# Altium footprint library 2.11-TQFP封装.PcbLib: 71 footprints (part 3 of 5)
Each footprint in its own frame and in the unit in brackets; x right, y up, seen from the top. Pads: shape width x height; smd on the part's side, far side on the other; paste and mask are expansions set on the pad; w line width, h text height; cw(c..) or ccw(c..) is an arc to the next point about the centre after c.
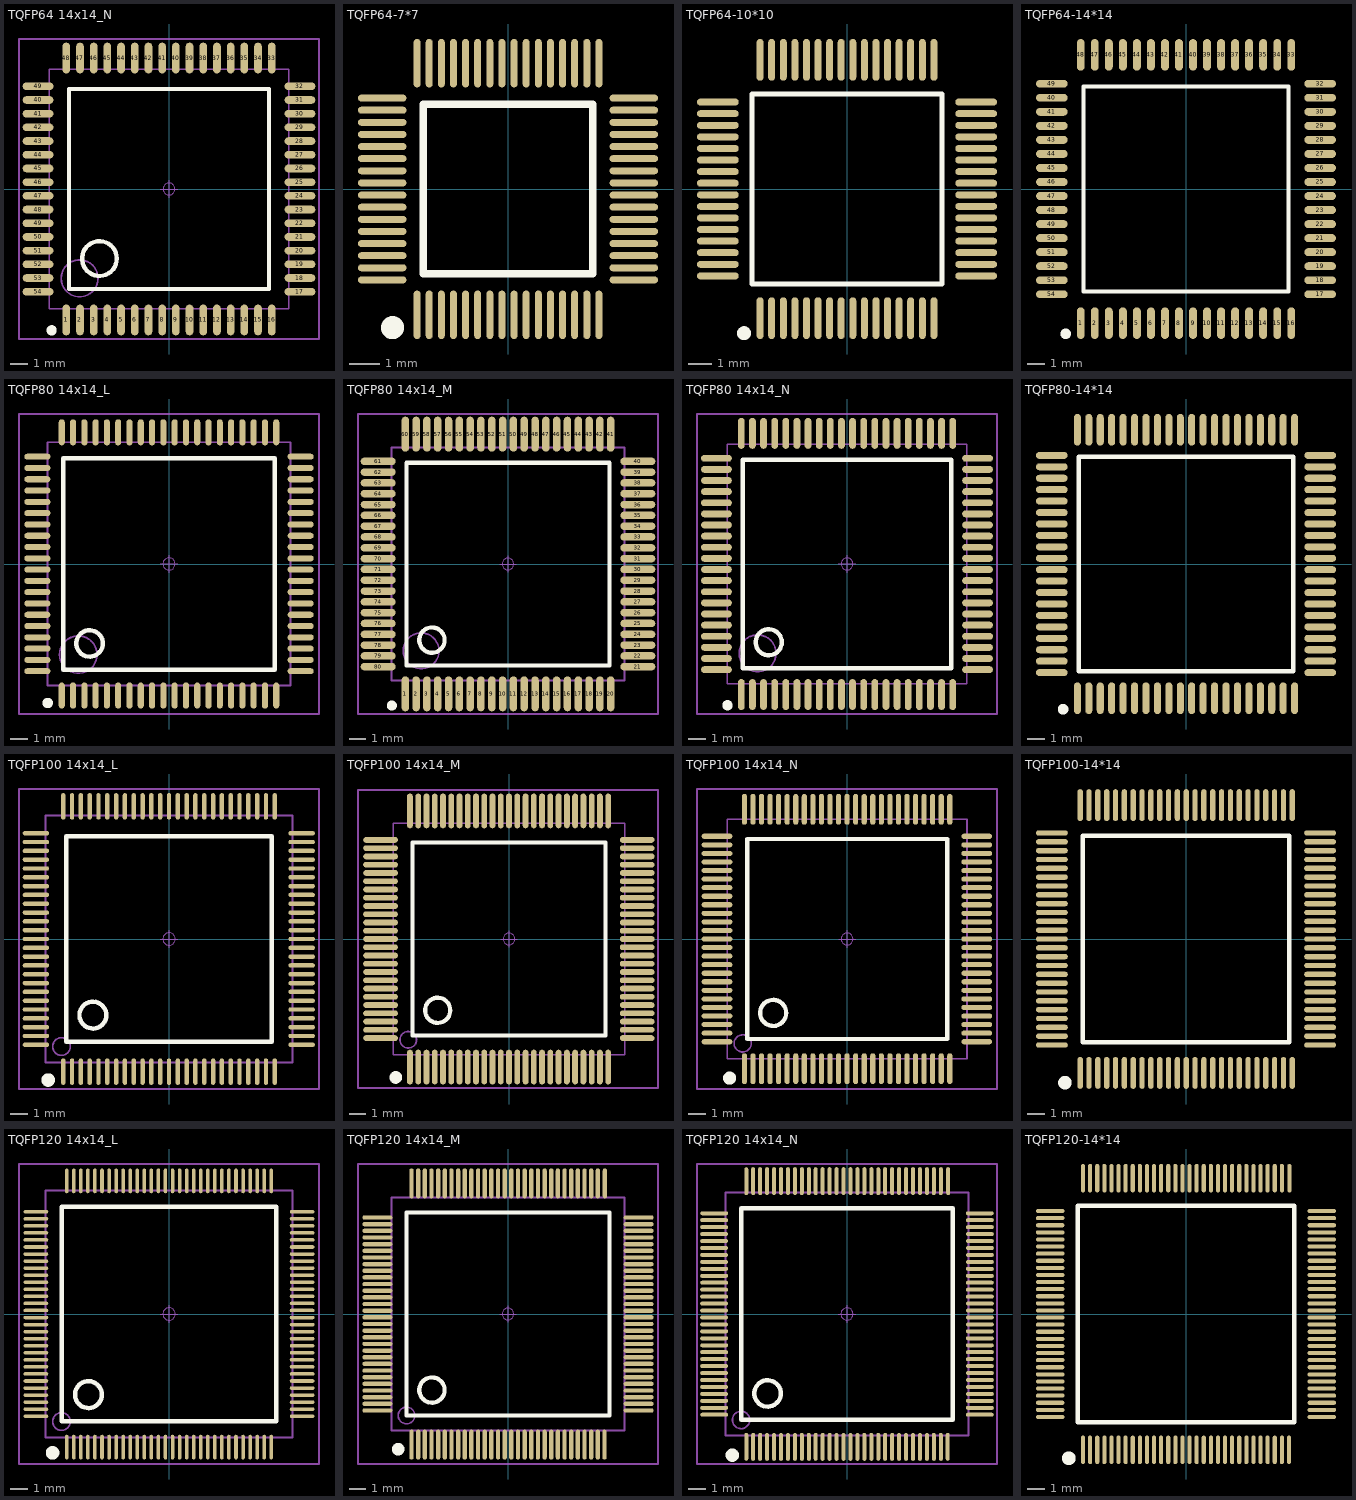
[diagram p2: the footprints below, top view; thin cyan lines are the x and y axes]

## TQFP64 14x14_N [mm] "64脚，体宽：14x14mm, 脚距：0.8mm"
pads (64):
  oval 0.45x1.8 smd: 1(-6,-7.651) 2(-5.2,-7.651) 3(-4.4,-7.651) 4(-3.6,-7.651) 5(-2.8,-7.651) 6(-2,-7.651) 7(-1.2,-7.651) 8(-0.4,-7.651) 9(0.4,-7.651) 10(1.2,-7.651) 11(2,-7.651) 12(2.8,-7.651) 13(3.6,-7.651) 14(4.4,-7.651) 15(5.2,-7.651) 16(6,-7.651) 33(6,7.651) 34(5.2,7.651) 35(4.4,7.651) 36(3.6,7.651) 37(2.8,7.651) 38(2,7.651) 39(1.2,7.651) 40(0.4,7.651) 41(-0.4,7.651) 42(-1.2,7.651) 43(-2,7.651) 44(-2.8,7.651) 45(-3.6,7.651) 46(-4.4,7.651) 47(-5.2,7.651) 48(-6,7.651)
  oval 1.8x0.45 smd: 17(7.651,-6) 18(7.651,-5.2) 19(7.651,-4.4) 20(7.651,-3.6) 21(7.651,-2.8) 22(7.651,-2) 23(7.651,-1.2) 24(7.651,-0.4) 25(7.651,0.4) 26(7.651,1.2) 27(7.651,2) 28(7.651,2.8) 29(7.651,3.6) 30(7.651,4.4) 31(7.651,5.2) 32(7.651,6) 40(-7.651,5.2) 41(-7.651,4.4) 42(-7.651,3.6) 43(-7.651,2.8) 44(-7.651,2) 45(-7.651,1.2) 46(-7.651,0.4) 47(-7.651,-0.4) 48(-7.651,-1.2) 49(-7.651,-2) 49(-7.651,6) 50(-7.651,-2.8) 51(-7.651,-3.6) 52(-7.651,-4.4) 53(-7.651,-5.2) 54(-7.651,-6)
Top Overlay:
  circle w0.35: c-6.858,-8.255 r0.125
  circle w0.254: c-4.064,-4.064 r1.016
  lines w0.254: -5.842,-5.842 5.842,-5.842 5.842,5.842 -5.842,5.842 -5.842,-5.842
Mechanical 13:
  circle w0.1: c-5.222,-5.222 r1.078
  lines w0.1: -7,-7 -7,7 7,7 7,-7 -7,-7
Mechanical 15:
  circle w0.05: c0,0 r0.35
  lines w0.05: -0.5,0 0.5,0 ; 0,-0.5 0,0.5
  lines w0.1: -8.763,-8.763 8.763,-8.763 8.763,8.763 -8.763,8.763 -8.763,-8.763
3D body "TQFP64 14x14.STEP": height 1.05, standoff -0.01, extent -8.002,-8.002 8.002,8.002

## TQFP64-7*7 [mm] "7x7mm, 0.4mm    封装库来自淘宝卖家 ID：黄晶宝石"
pads (64):
  oval 0.23x1.6 smd: 1(-3,-4.146) 2(-2.6,-4.146) 3(-2.2,-4.146) 4(-1.8,-4.146) 5(-1.4,-4.146) 6(-1,-4.146) 7(-0.6,-4.146) 8(-0.2,-4.146) 9(0.2,-4.146) 10(0.6,-4.146) 11(1,-4.146) 12(1.4,-4.146) 13(1.8,-4.146) 14(2.2,-4.146) 15(2.6,-4.146) 16(3,-4.146) 33(3,4.152) 34(2.6,4.152) 35(2.2,4.152) 36(1.8,4.152) 37(1.4,4.152) 38(1,4.152) 39(0.6,4.152) 40(0.2,4.152) 41(-0.2,4.152) 42(-0.6,4.152) 43(-1,4.152) 44(-1.4,4.152) 45(-1.8,4.152) 46(-2.2,4.152) 47(-2.6,4.152) 48(-3,4.152)
  oval 1.6x0.23 smd: 17(4.149,-2.997) 18(4.149,-2.597) 19(4.149,-2.197) 20(4.149,-1.797) 21(4.149,-1.397) 22(4.149,-0.997) 23(4.149,-0.597) 24(4.149,-0.197) 25(4.149,0.203) 26(4.149,0.603) 27(4.149,1.003) 28(4.149,1.403) 29(4.149,1.803) 30(4.149,2.203) 31(4.149,2.603) 32(4.149,3.003) 49(-4.149,3.003) 50(-4.149,2.603) 51(-4.149,2.203) 52(-4.149,1.803) 53(-4.149,1.403) 54(-4.149,1.003) 55(-4.149,0.603) 56(-4.149,0.203) 57(-4.149,-0.197) 58(-4.149,-0.597) 59(-4.149,-0.997) 60(-4.149,-1.397) 61(-4.149,-1.797) 62(-4.149,-2.197) 63(-4.149,-2.597) 64(-4.149,-2.997)
Top Overlay:
  circle w0.508: c-3.81,-4.572 r0.127
  lines w0.254: -2.794,-2.791 -2.794,2.797 2.794,2.797 2.794,-2.791 -2.794,-2.791
3D body "TQFP64_7x7.STEP": height 1.05, standoff 0, extent -4.502,-4.502 4.502,4.502

## TQFP64-10*10 [mm] "10x10mm, 0.5mm     封装库来自淘宝卖家 ID：黄晶宝石"
pads (64):
  oval 0.3x1.8 smd: 1(-3.75,-5.574) 2(-3.25,-5.574) 3(-2.75,-5.574) 4(-2.25,-5.574) 5(-1.75,-5.574) 6(-1.25,-5.574) 7(-0.75,-5.574) 8(-0.25,-5.574) 9(0.25,-5.574) 10(0.75,-5.574) 11(1.25,-5.574) 12(1.75,-5.574) 13(2.25,-5.574) 14(2.75,-5.574) 15(3.25,-5.574) 16(3.75,-5.574) 33(3.75,5.574) 34(3.25,5.574) 35(2.75,5.574) 36(2.25,5.574) 37(1.75,5.574) 38(1.25,5.574) 39(0.75,5.574) 40(0.25,5.574) 41(-0.25,5.574) 42(-0.75,5.574) 43(-1.25,5.574) 44(-1.75,5.574) 45(-2.25,5.574) 46(-2.75,5.574) 47(-3.25,5.574) 48(-3.75,5.574)
  oval 1.8x0.3 smd: 17(5.574,-3.75) 18(5.574,-3.25) 19(5.574,-2.75) 20(5.574,-2.25) 21(5.574,-1.75) 22(5.574,-1.25) 23(5.574,-0.75) 24(5.574,-0.25) 25(5.574,0.25) 26(5.574,0.75) 27(5.574,1.25) 28(5.574,1.75) 29(5.574,2.25) 30(5.574,2.75) 31(5.574,3.25) 32(5.574,3.75) 49(-5.574,3.75) 50(-5.574,3.25) 51(-5.574,2.75) 52(-5.574,2.25) 53(-5.574,1.75) 54(-5.574,1.25) 55(-5.574,0.75) 56(-5.574,0.25) 57(-5.574,-0.25) 58(-5.574,-0.75) 59(-5.574,-1.25) 60(-5.574,-1.75) 61(-5.574,-2.25) 62(-5.574,-2.75) 63(-5.574,-3.25) 64(-5.574,-3.75)
Top Overlay:
  circle w0.35: c-4.445,-6.223 r0.125
  lines w0.2: -4.1,-4.1 4.1,-4.1 4.1,4.1 -4.1,4.1 -4.1,-4.1
3D body "TQFP64_10x10.STEP": height 1.05, standoff 0, extent -6.002,-6.002 6.002,6.002

## TQFP64-14*14 [mm] "14x14mm, 0.8mm     封装库来自淘宝卖家 ID：黄晶宝石"
pads (64):
  oval 0.45x1.8 smd: 1(-6,-7.651) 2(-5.2,-7.651) 3(-4.4,-7.651) 4(-3.6,-7.651) 5(-2.8,-7.651) 6(-2,-7.651) 7(-1.2,-7.651) 8(-0.4,-7.651) 9(0.4,-7.651) 10(1.2,-7.651) 11(2,-7.651) 12(2.8,-7.651) 13(3.6,-7.651) 14(4.4,-7.651) 15(5.2,-7.651) 16(6,-7.651) 33(6,7.651) 34(5.2,7.651) 35(4.4,7.651) 36(3.6,7.651) 37(2.8,7.651) 38(2,7.651) 39(1.2,7.651) 40(0.4,7.651) 41(-0.4,7.651) 42(-1.2,7.651) 43(-2,7.651) 44(-2.8,7.651) 45(-3.6,7.651) 46(-4.4,7.651) 47(-5.2,7.651) 48(-6,7.651)
  oval 1.8x0.45 smd: 17(7.651,-6) 18(7.651,-5.2) 19(7.651,-4.4) 20(7.651,-3.6) 21(7.651,-2.8) 22(7.651,-2) 23(7.651,-1.2) 24(7.651,-0.4) 25(7.651,0.4) 26(7.651,1.2) 27(7.651,2) 28(7.651,2.8) 29(7.651,3.6) 30(7.651,4.4) 31(7.651,5.2) 32(7.651,6) 40(-7.651,5.2) 41(-7.651,4.4) 42(-7.651,3.6) 43(-7.651,2.8) 44(-7.651,2) 45(-7.651,1.2) 46(-7.651,0.4) 47(-7.651,-0.4) 48(-7.651,-1.2) 49(-7.651,-2) 49(-7.651,6) 50(-7.651,-2.8) 51(-7.651,-3.6) 52(-7.651,-4.4) 53(-7.651,-5.2) 54(-7.651,-6)
Top Overlay:
  circle w0.35: c-6.858,-8.255 r0.125
  lines w0.254: -5.842,-5.842 5.842,-5.842 5.842,5.842 -5.842,5.842 -5.842,-5.842
3D body "TQFP64_14x14.STEP": height 1.05, standoff 0, extent -8.002,-8.002 8.002,8.002

## TQFP80 14x14_L [mm] "80脚，体宽：14x14mm, 脚距：0.65mm"
pads (80):
  oval 0.35x1.5 smd: 1(-6.175,-7.574) 2(-5.525,-7.574) 3(-4.875,-7.574) 4(-4.225,-7.574) 5(-3.575,-7.574) 6(-2.925,-7.574) 7(-2.275,-7.574) 8(-1.625,-7.574) 9(-0.975,-7.574) 10(-0.325,-7.574) 11(0.325,-7.574) 12(0.975,-7.574) 13(1.625,-7.574) 14(2.275,-7.574) 15(2.925,-7.574) 16(3.575,-7.574) 17(4.225,-7.574) 18(4.875,-7.574) 19(5.525,-7.574) 20(6.175,-7.574) 41(6.175,7.579) 42(5.525,7.579) 43(4.875,7.579) 44(4.225,7.579) 45(3.575,7.579) 46(2.925,7.579) 47(2.275,7.579) 48(1.625,7.579) 49(0.975,7.579) 50(0.325,7.579) 51(-0.325,7.579) 52(-0.975,7.579) 53(-1.625,7.579) 54(-2.275,7.579) 55(-2.925,7.579) 56(-3.575,7.579) 57(-4.225,7.579) 58(-4.875,7.579) 59(-5.525,7.579) 60(-6.175,7.579)
  oval 1.5x0.35 smd: 21(7.577,-6.172) 22(7.577,-5.522) 23(7.577,-4.872) 24(7.577,-4.222) 25(7.577,-3.572) 26(7.577,-2.922) 27(7.577,-2.272) 28(7.577,-1.622) 29(7.577,-0.972) 30(7.577,-0.322) 31(7.577,0.328) 32(7.577,0.978) 33(7.577,1.628) 34(7.577,2.278) 35(7.577,2.928) 36(7.577,3.578) 37(7.577,4.228) 38(7.577,4.878) 39(7.577,5.528) 40(7.577,6.178) 61(-7.577,6.178) 62(-7.577,5.528) 63(-7.577,4.878) 64(-7.577,4.228) 65(-7.577,3.578) 66(-7.577,2.928) 67(-7.577,2.278) 68(-7.577,1.628) 69(-7.577,0.978) 70(-7.577,0.328) 71(-7.577,-0.322) 72(-7.577,-0.972) 73(-7.577,-1.622) 74(-7.577,-2.272) 75(-7.577,-2.922) 76(-7.577,-3.572) 77(-7.577,-4.222) 78(-7.577,-4.872) 79(-7.577,-5.522) 80(-7.577,-6.172)
Top Overlay:
  circle w0.35: c-6.983,-8.001 r0.125
  circle w0.254: c-4.572,-4.572 r0.762
  lines w0.254: -6.096,-6.096 6.096,-6.096 6.096,6.096 -6.096,6.096 -6.096,-6.096
Mechanical 13:
  circle w0.1: c-5.222,-5.219 r1.078
  lines w0.1: -7,-6.997 -7,7.003 7,7.003 7,-6.997 -7,-6.997
Mechanical 15:
  circle w0.05: c0,0.003 r0.35
  lines w0.05: -0.5,0.003 0.5,0.003 ; 0,-0.497 0,0.503
  lines w0.1: -8.636,-8.636 8.636,-8.636 8.636,8.636 -8.636,8.636 -8.636,-8.636
3D body "TQFP80 14x14.STEP": height 1.05, standoff -0.01, extent -8.002,-7.999 8.002,8.005

## TQFP80 14x14_M [mm] "80脚，体宽：14x14mm, 脚距：0.65mm  淘宝ID:黄晶宝石"
pads (80):
  oval 0.45x2.1 smd: 1(-6.175,-7.805) 2(-5.525,-7.805) 3(-4.875,-7.805) 4(-4.225,-7.805) 5(-3.575,-7.805) 6(-2.925,-7.805) 7(-2.275,-7.805) 8(-1.625,-7.805) 9(-0.975,-7.805) 10(-0.325,-7.805) 11(0.325,-7.805) 12(0.975,-7.805) 13(1.625,-7.805) 14(2.275,-7.805) 15(2.925,-7.805) 16(3.575,-7.805) 17(4.225,-7.805) 18(4.875,-7.805) 19(5.525,-7.805) 20(6.175,-7.805) 41(6.175,7.805) 42(5.525,7.805) 43(4.875,7.805) 44(4.225,7.805) 45(3.575,7.805) 46(2.925,7.805) 47(2.275,7.805) 48(1.625,7.805) 49(0.975,7.805) 50(0.325,7.805) 51(-0.325,7.805) 52(-0.975,7.805) 53(-1.625,7.805) 54(-2.275,7.805) 55(-2.925,7.805) 56(-3.575,7.805) 57(-4.225,7.805) 58(-4.875,7.805) 59(-5.525,7.805) 60(-6.175,7.805)
  oval 2.1x0.45 smd: 21(7.805,-6.175) 22(7.805,-5.525) 23(7.805,-4.875) 24(7.805,-4.225) 25(7.805,-3.575) 26(7.805,-2.925) 27(7.805,-2.275) 28(7.805,-1.625) 29(7.805,-0.975) 30(7.805,-0.325) 31(7.805,0.325) 32(7.805,0.975) 33(7.805,1.625) 34(7.805,2.275) 35(7.805,2.925) 36(7.805,3.575) 37(7.805,4.225) 38(7.805,4.875) 39(7.805,5.525) 40(7.805,6.175) 61(-7.805,6.175) 62(-7.805,5.525) 63(-7.805,4.875) 64(-7.805,4.225) 65(-7.805,3.575) 66(-7.805,2.925) 67(-7.805,2.275) 68(-7.805,1.625) 69(-7.805,0.975) 70(-7.805,0.325) 71(-7.805,-0.325) 72(-7.805,-0.975) 73(-7.805,-1.625) 74(-7.805,-2.275) 75(-7.805,-2.925) 76(-7.805,-3.575) 77(-7.805,-4.225) 78(-7.805,-4.875) 79(-7.805,-5.525) 80(-7.805,-6.175)
Top Overlay:
  circle w0.35: c-6.985,-8.509 r0.125
  circle w0.254: c-4.572,-4.575 r0.762
  lines w0.254: -6.096,-6.099 6.096,-6.099 6.096,6.093 -6.096,6.093 -6.096,-6.099
Mechanical 13:
  circle w0.1: c-5.222,-5.222 r1.078
  lines w0.1: -7,-7 -7,7 7,7 7,-7 -7,-7
Mechanical 15:
  circle w0.05: c0,0 r0.35
  lines w0.05: -0.5,0 0.5,0 ; 0,-0.5 0,0.5
  lines w0.1: -9.017,-9.017 9.017,-9.017 9.017,9.017 -9.017,9.017 -9.017,-9.017
3D body "TQFP80 14x14.STEP": height 1.05, standoff -0.01, extent -8.002,-8.002 8.002,8.002

## TQFP80 14x14_N [mm] "80脚，体宽：14x14mm, 脚距：0.65mm"
pads (80):
  oval 0.4x1.8 smd: 1(-6.175,-7.625) 2(-5.525,-7.625) 3(-4.875,-7.625) 4(-4.225,-7.625) 5(-3.575,-7.625) 6(-2.925,-7.625) 7(-2.275,-7.625) 8(-1.625,-7.625) 9(-0.975,-7.625) 10(-0.325,-7.625) 11(0.325,-7.625) 12(0.975,-7.625) 13(1.625,-7.625) 14(2.275,-7.625) 15(2.925,-7.625) 16(3.575,-7.625) 17(4.225,-7.625) 18(4.875,-7.625) 19(5.525,-7.625) 20(6.175,-7.625) 41(6.175,7.63) 42(5.525,7.63) 43(4.875,7.63) 44(4.225,7.63) 45(3.575,7.63) 46(2.925,7.63) 47(2.275,7.63) 48(1.625,7.63) 49(0.975,7.63) 50(0.325,7.63) 51(-0.325,7.63) 52(-0.975,7.63) 53(-1.625,7.63) 54(-2.275,7.63) 55(-2.925,7.63) 56(-3.575,7.63) 57(-4.225,7.63) 58(-4.875,7.63) 59(-5.525,7.63) 60(-6.175,7.63)
  oval 1.8x0.4 smd: 21(7.627,-6.172) 22(7.627,-5.522) 23(7.627,-4.872) 24(7.627,-4.222) 25(7.627,-3.572) 26(7.627,-2.922) 27(7.627,-2.272) 28(7.627,-1.622) 29(7.627,-0.972) 30(7.627,-0.322) 31(7.627,0.328) 32(7.627,0.978) 33(7.627,1.628) 34(7.627,2.278) 35(7.627,2.928) 36(7.627,3.578) 37(7.627,4.228) 38(7.627,4.878) 39(7.627,5.528) 40(7.627,6.178) 61(-7.627,6.178) 62(-7.627,5.528) 63(-7.627,4.878) 64(-7.627,4.228) 65(-7.627,3.578) 66(-7.627,2.928) 67(-7.627,2.278) 68(-7.627,1.628) 69(-7.627,0.978) 70(-7.627,0.328) 71(-7.627,-0.322) 72(-7.627,-0.972) 73(-7.627,-1.622) 74(-7.627,-2.272) 75(-7.627,-2.922) 76(-7.627,-3.572) 77(-7.627,-4.222) 78(-7.627,-4.872) 79(-7.627,-5.522) 80(-7.627,-6.172)
Top Overlay:
  circle w0.254: c-4.572,-4.572 r0.762
  circle w0.35: c-6.985,-8.255 r0.125
  lines w0.254: -6.096,-6.096 -6.096,6.096 6.096,6.096 6.096,-6.096 -6.096,-6.096
Mechanical 13:
  circle w0.1: c-5.222,-5.219 r1.078
  lines w0.1: -7,-6.997 7,-6.997 7,7.003 -7,7.003 -7,-6.997
Mechanical 15:
  circle w0.05: c0,0.003 r0.35
  lines w0.05: -0.5,0.003 0.5,0.003 ; 0,-0.497 0,0.503
  lines w0.1: -8.763,-8.763 -8.763,8.763 8.763,8.763 8.763,-8.763 -8.763,-8.763
3D body "TQFP80 14x14.STEP": height 1.05, standoff -0.01, extent -8.002,-7.999 8.002,8.005

## TQFP80-14*14 [mm] "14x14mm, 0.65mm       封装库来自淘宝卖家 ID：黄晶宝石"
pads (80):
  oval 0.4x1.8 smd: 1(-6.175,-7.625) 2(-5.525,-7.625) 3(-4.875,-7.625) 4(-4.225,-7.625) 5(-3.575,-7.625) 6(-2.925,-7.625) 7(-2.275,-7.625) 8(-1.625,-7.625) 9(-0.975,-7.625) 10(-0.325,-7.625) 11(0.325,-7.625) 12(0.975,-7.625) 13(1.625,-7.625) 14(2.275,-7.625) 15(2.925,-7.625) 16(3.575,-7.625) 17(4.225,-7.625) 18(4.875,-7.625) 19(5.525,-7.625) 20(6.175,-7.625) 41(6.175,7.63) 42(5.525,7.63) 43(4.875,7.63) 44(4.225,7.63) 45(3.575,7.63) 46(2.925,7.63) 47(2.275,7.63) 48(1.625,7.63) 49(0.975,7.63) 50(0.325,7.63) 51(-0.325,7.63) 52(-0.975,7.63) 53(-1.625,7.63) 54(-2.275,7.63) 55(-2.925,7.63) 56(-3.575,7.63) 57(-4.225,7.63) 58(-4.875,7.63) 59(-5.525,7.63) 60(-6.175,7.63)
  oval 1.8x0.4 smd: 21(7.627,-6.172) 22(7.627,-5.522) 23(7.627,-4.872) 24(7.627,-4.222) 25(7.627,-3.572) 26(7.627,-2.922) 27(7.627,-2.272) 28(7.627,-1.622) 29(7.627,-0.972) 30(7.627,-0.322) 31(7.627,0.328) 32(7.627,0.978) 33(7.627,1.628) 34(7.627,2.278) 35(7.627,2.928) 36(7.627,3.578) 37(7.627,4.228) 38(7.627,4.878) 39(7.627,5.528) 40(7.627,6.178) 61(-7.627,6.178) 62(-7.627,5.528) 63(-7.627,4.878) 64(-7.627,4.228) 65(-7.627,3.578) 66(-7.627,2.928) 67(-7.627,2.278) 68(-7.627,1.628) 69(-7.627,0.978) 70(-7.627,0.328) 71(-7.627,-0.322) 72(-7.627,-0.972) 73(-7.627,-1.622) 74(-7.627,-2.272) 75(-7.627,-2.922) 76(-7.627,-3.572) 77(-7.627,-4.222) 78(-7.627,-4.872) 79(-7.627,-5.522) 80(-7.627,-6.172)
Top Overlay:
  circle w0.35: c-6.985,-8.255 r0.125
  lines w0.254: -6.096,-6.096 6.096,-6.096 6.096,6.096 -6.096,6.096 -6.096,-6.096
3D body "TQFP80_14x14.STEP": height 1.05, standoff 0, extent -8.002,-8.002 8.002,8.002

## TQFP100 14x14_L [mm] "100脚，体宽：14x14mm, 脚距：0.5mm          淘宝ID:黄晶宝石"
pads (100):
  oval 0.25x1.5 smd: 1(-6,-7.524) 2(-5.5,-7.524) 3(-5,-7.524) 4(-4.5,-7.524) 5(-4,-7.524) 6(-3.5,-7.524) 7(-3,-7.524) 8(-2.5,-7.524) 9(-2,-7.524) 10(-1.5,-7.524) 11(-1,-7.524) 12(-0.5,-7.524) 13(0,-7.524) 14(0.5,-7.524) 15(1,-7.524) 16(1.5,-7.524) 17(2,-7.524) 18(2.5,-7.524) 19(3,-7.524) 20(3.5,-7.524) 21(4,-7.524) 22(4.5,-7.524) 23(5,-7.524) 24(5.5,-7.524) 25(6,-7.524) 51(6,7.524) 52(5.5,7.524) 53(5,7.524) 54(4.5,7.524) 55(4,7.524) 56(3.5,7.524) 57(3,7.524) 58(2.5,7.524) 59(2,7.524) 60(1.5,7.524) 61(1,7.524) 62(0.5,7.524) 63(0,7.524) 64(-0.5,7.524) 65(-1,7.524) 66(-1.5,7.524) 67(-2,7.524) 68(-2.5,7.524) 69(-3,7.524) 70(-3.5,7.524) 71(-4,7.524) 72(-4.5,7.524) 73(-5,7.524) 74(-5.5,7.524) 75(-6,7.524)
  oval 1.5x0.25 smd: 26(7.524,-6) 27(7.524,-5.5) 28(7.524,-5) 29(7.524,-4.5) 30(7.524,-4) 31(7.524,-3.5) 32(7.524,-3) 33(7.524,-2.5) 34(7.524,-2) 35(7.524,-1.5) 36(7.524,-1) 37(7.524,-0.5) 38(7.524,0) 39(7.524,0.5) 40(7.524,1) 41(7.524,1.5) 42(7.524,2) 43(7.524,2.5) 44(7.524,3) 45(7.524,3.5) 46(7.524,4) 47(7.524,4.5) 48(7.524,5) 49(7.524,5.5) 50(7.524,6) 76(-7.549,6) 77(-7.549,5.5) 78(-7.549,5) 79(-7.549,4.5) 80(-7.549,4) 81(-7.549,3.5) 82(-7.549,3) 83(-7.549,2.5) 84(-7.549,2) 85(-7.549,1.5) 86(-7.549,1) 87(-7.549,0.5) 88(-7.549,0) 89(-7.549,-0.5) 90(-7.549,-1) 91(-7.549,-1.5) 92(-7.549,-2) 93(-7.549,-2.5) 94(-7.549,-3) 95(-7.549,-3.5) 96(-7.549,-4) 97(-7.549,-4.5) 98(-7.549,-5) 99(-7.549,-5.5) 100(-7.549,-6)
Top Overlay:
  circle w0.254: c-4.318,-4.318 r0.762
  circle w0.508: c-6.858,-8.001 r0.127
  lines w0.254: -5.842,-5.842 5.842,-5.842 5.842,5.842 -5.842,5.842 -5.842,-5.842
Mechanical 13:
  circle w0.1: c-6.1,-6.1 r0.5
  lines w0.1: -7,-7 7,-7 7,7 -7,7 -7,-7
Mechanical 15:
  circle w0.05: c0,0 r0.35
  lines w0.05: -0.5,0 0.5,0 ; 0,-0.5 0,0.5
  lines w0.1: -8.509,-8.509 8.509,-8.509 8.509,8.509 -8.509,8.509 -8.509,-8.509
3D body "TQFP100 14x14.STEP": height 1.05, standoff -0.01, extent -8.002,-8.002 8.002,8.002

## TQFP100 14x14_M [mm] "100脚，体宽：14x14mm, 脚距：0.5mm"
pads (100):
  oval 0.35x2.1 smd: 1(-6,-7.752) 2(-5.5,-7.752) 3(-5,-7.752) 4(-4.5,-7.752) 5(-4,-7.752) 6(-3.5,-7.752) 7(-3,-7.752) 8(-2.5,-7.752) 9(-2,-7.752) 10(-1.5,-7.752) 11(-1,-7.752) 12(-0.5,-7.752) 13(0,-7.752) 14(0.5,-7.752) 15(1,-7.752) 16(1.5,-7.752) 17(2,-7.752) 18(2.5,-7.752) 19(3,-7.752) 20(3.5,-7.752) 21(4,-7.752) 22(4.5,-7.752) 23(5,-7.752) 24(5.5,-7.752) 25(6,-7.752) 51(6,7.752) 52(5.5,7.752) 53(5,7.752) 54(4.5,7.752) 55(4,7.752) 56(3.5,7.752) 57(3,7.752) 58(2.5,7.752) 59(2,7.752) 60(1.5,7.752) 61(1,7.752) 62(0.5,7.752) 63(0,7.752) 64(-0.5,7.752) 65(-1,7.752) 66(-1.5,7.752) 67(-2,7.752) 68(-2.5,7.752) 69(-3,7.752) 70(-3.5,7.752) 71(-4,7.752) 72(-4.5,7.752) 73(-5,7.752) 74(-5.5,7.752) 75(-6,7.752)
  oval 2.1x0.35 smd: 26(7.752,-6) 27(7.752,-5.5) 28(7.752,-5) 29(7.752,-4.5) 30(7.752,-4) 31(7.752,-3.5) 32(7.752,-3) 33(7.752,-2.5) 34(7.752,-2) 35(7.752,-1.5) 36(7.752,-1) 37(7.752,-0.5) 38(7.752,0) 39(7.752,0.5) 40(7.752,1) 41(7.752,1.5) 42(7.752,2) 43(7.752,2.5) 44(7.752,3) 45(7.752,3.5) 46(7.752,4) 47(7.752,4.5) 48(7.752,5) 49(7.752,5.5) 50(7.752,6) 76(-7.778,6) 77(-7.778,5.5) 78(-7.778,5) 79(-7.778,4.5) 80(-7.778,4) 81(-7.778,3.5) 82(-7.778,3) 83(-7.778,2.5) 84(-7.778,2) 85(-7.778,1.5) 86(-7.778,1) 87(-7.778,0.5) 88(-7.778,0) 89(-7.778,-0.5) 90(-7.778,-1) 91(-7.778,-1.5) 92(-7.778,-2) 93(-7.778,-2.5) 94(-7.778,-3) 95(-7.778,-3.5) 96(-7.778,-4) 97(-7.778,-4.5) 98(-7.778,-5) 99(-7.778,-5.5) 100(-7.778,-6)
Top Overlay:
  circle w0.508: c-6.858,-8.382 r0.127
  circle w0.254: c-4.318,-4.318 r0.762
  lines w0.254: -5.842,-5.842 -5.842,5.842 5.842,5.842 5.842,-5.842 -5.842,-5.842
Mechanical 13:
  circle w0.1: c-6.1,-6.1 r0.5
  lines w0.1: -7,-7 -7,7 7,7 7,-7 -7,-7
Mechanical 15:
  circle w0.05: c0,0 r0.35
  lines w0.05: -0.5,0 0.5,0 ; 0,-0.5 0,0.5
  lines w0.1: -9.144,-9.017 -9.144,9.017 9.017,9.017 9.017,-9.017 -9.144,-9.017
3D body "TQFP100 14x14.STEP": height 1.05, standoff -0.01, extent -8.002,-8.002 8.002,8.002

## TQFP100 14x14_N [mm] "100脚，体宽：14x14mm, 脚距：0.5mm  淘宝ID:黄晶宝石"
pads (100):
  oval 0.3x1.8 smd: 1(-5.995,-7.575) 2(-5.495,-7.575) 3(-4.995,-7.575) 4(-4.495,-7.575) 5(-3.995,-7.575) 6(-3.495,-7.575) 7(-2.995,-7.575) 8(-2.495,-7.575) 9(-1.995,-7.575) 10(-1.495,-7.575) 11(-0.995,-7.575) 12(-0.495,-7.575) 13(0.005,-7.575) 14(0.505,-7.575) 15(1.005,-7.575) 16(1.505,-7.575) 17(2.005,-7.575) 18(2.505,-7.575) 19(3.005,-7.575) 20(3.505,-7.575) 21(4.005,-7.575) 22(4.505,-7.575) 23(5.005,-7.575) 24(5.505,-7.575) 25(6.005,-7.575) 51(6.005,7.575) 52(5.505,7.575) 53(5.005,7.575) 54(4.505,7.575) 55(4.005,7.575) 56(3.505,7.575) 57(3.005,7.575) 58(2.505,7.575) 59(2.005,7.575) 60(1.505,7.575) 61(1.005,7.575) 62(0.505,7.575) 63(0.005,7.575) 64(-0.495,7.575) 65(-0.995,7.575) 66(-1.495,7.575) 67(-1.995,7.575) 68(-2.495,7.575) 69(-2.995,7.575) 70(-3.495,7.575) 71(-3.995,7.575) 72(-4.495,7.575) 73(-4.995,7.575) 74(-5.495,7.575) 75(-5.995,7.575)
  oval 1.8x0.3 smd: 26(7.58,-6) 27(7.58,-5.5) 28(7.58,-5) 29(7.58,-4.5) 30(7.58,-4) 31(7.58,-3.5) 32(7.58,-3) 33(7.58,-2.5) 34(7.58,-2) 35(7.58,-1.5) 36(7.58,-1) 37(7.58,-0.5) 38(7.58,0) 39(7.58,0.5) 40(7.58,1) 41(7.58,1.5) 42(7.58,2) 43(7.58,2.5) 44(7.58,3) 45(7.58,3.5) 46(7.58,4) 47(7.58,4.5) 48(7.58,5) 49(7.58,5.5) 50(7.58,6) 76(-7.595,6) 77(-7.595,5.5) 78(-7.595,5) 79(-7.595,4.5) 80(-7.595,4) 81(-7.595,3.5) 82(-7.595,3) 83(-7.595,2.5) 84(-7.595,2) 85(-7.595,1.5) 86(-7.595,1) 87(-7.595,0.5) 88(-7.595,0) 89(-7.595,-0.5) 90(-7.595,-1) 91(-7.595,-1.5) 92(-7.595,-2) 93(-7.595,-2.5) 94(-7.595,-3) 95(-7.595,-3.5) 96(-7.595,-4) 97(-7.595,-4.5) 98(-7.595,-5) 99(-7.595,-5.5) 100(-7.595,-6)
Top Overlay:
  circle w0.254: c-4.313,-4.318 r0.762
  circle w0.508: c-6.858,-8.128 r0.127
  lines w0.254: -5.837,-5.842 5.847,-5.842 5.847,5.842 -5.837,5.842 -5.837,-5.842
Mechanical 13:
  circle w0.1: c-6.095,-6.1 r0.5
  lines w0.1: -6.995,-7 7.005,-7 7.005,7 -6.995,7 -6.995,-7
Mechanical 15:
  circle w0.05: c0.005,0 r0.35
  lines w0.05: -0.495,0 0.505,0 ; 0.005,-0.5 0.005,0.5
  lines w0.1: -8.763,-8.763 8.763,-8.763 8.763,8.763 -8.763,8.763 -8.763,-8.763
3D body "TQFP100 14x14.STEP": height 1.05, standoff -0.01, extent -7.997,-8.002 8.007,8.002

## TQFP100-14*14 [mm] "14x14mm, 0.5mm      封装库来自淘宝卖家 ID：黄晶宝石"
pads (100):
  oval 0.3x1.8 smd: 1(-5.995,-7.575) 2(-5.495,-7.575) 3(-4.995,-7.575) 4(-4.495,-7.575) 5(-3.995,-7.575) 6(-3.495,-7.575) 7(-2.995,-7.575) 8(-2.495,-7.575) 9(-1.995,-7.575) 10(-1.495,-7.575) 11(-0.995,-7.575) 12(-0.495,-7.575) 13(0.005,-7.575) 14(0.505,-7.575) 15(1.005,-7.575) 16(1.505,-7.575) 17(2.005,-7.575) 18(2.505,-7.575) 19(3.005,-7.575) 20(3.505,-7.575) 21(4.005,-7.575) 22(4.505,-7.575) 23(5.005,-7.575) 24(5.505,-7.575) 25(6.005,-7.575) 51(6.005,7.575) 52(5.505,7.575) 53(5.005,7.575) 54(4.505,7.575) 55(4.005,7.575) 56(3.505,7.575) 57(3.005,7.575) 58(2.505,7.575) 59(2.005,7.575) 60(1.505,7.575) 61(1.005,7.575) 62(0.505,7.575) 63(0.005,7.575) 64(-0.495,7.575) 65(-0.995,7.575) 66(-1.495,7.575) 67(-1.995,7.575) 68(-2.495,7.575) 69(-2.995,7.575) 70(-3.495,7.575) 71(-3.995,7.575) 72(-4.495,7.575) 73(-4.995,7.575) 74(-5.495,7.575) 75(-5.995,7.575)
  oval 1.8x0.3 smd: 26(7.58,-6) 27(7.58,-5.5) 28(7.58,-5) 29(7.58,-4.5) 30(7.58,-4) 31(7.58,-3.5) 32(7.58,-3) 33(7.58,-2.5) 34(7.58,-2) 35(7.58,-1.5) 36(7.58,-1) 37(7.58,-0.5) 38(7.58,0) 39(7.58,0.5) 40(7.58,1) 41(7.58,1.5) 42(7.58,2) 43(7.58,2.5) 44(7.58,3) 45(7.58,3.5) 46(7.58,4) 47(7.58,4.5) 48(7.58,5) 49(7.58,5.5) 50(7.58,6) 76(-7.595,6) 77(-7.595,5.5) 78(-7.595,5) 79(-7.595,4.5) 80(-7.595,4) 81(-7.595,3.5) 82(-7.595,3) 83(-7.595,2.5) 84(-7.595,2) 85(-7.595,1.5) 86(-7.595,1) 87(-7.595,0.5) 88(-7.595,0) 89(-7.595,-0.5) 90(-7.595,-1) 91(-7.595,-1.5) 92(-7.595,-2) 93(-7.595,-2.5) 94(-7.595,-3) 95(-7.595,-3.5) 96(-7.595,-4) 97(-7.595,-4.5) 98(-7.595,-5) 99(-7.595,-5.5) 100(-7.595,-6)
Top Overlay:
  circle w0.508: c-6.858,-8.128 r0.127
  lines w0.254: -5.837,-5.842 -5.837,5.842 5.847,5.842 5.847,-5.842 -5.837,-5.842
3D body "TQFP100_14x14.STEP": height 1.05, standoff 0, extent -8.002,-8.002 8.002,8.002

## TQFP120 14x14_L [mm] "120脚，体宽：14x14mm, 脚距：0.4mm 淘宝ID:黄晶宝石"
pads (120):
  oval 0.2x1.4 smd: 1(-5.8,-7.549) 2(-5.4,-7.549) 3(-5,-7.549) 4(-4.6,-7.549) 5(-4.2,-7.549) 6(-3.8,-7.549) 7(-3.4,-7.549) 8(-3,-7.549) 9(-2.6,-7.549) 10(-2.2,-7.549) 11(-1.8,-7.549) 12(-1.4,-7.549) 13(-1,-7.549) 14(-0.6,-7.549) 15(-0.2,-7.549) 16(0.2,-7.549) 17(0.6,-7.549) 18(1,-7.549) 19(1.4,-7.549) 20(1.8,-7.549) 21(2.2,-7.549) 22(2.6,-7.549) 23(3,-7.549) 24(3.4,-7.549) 25(3.8,-7.549) 26(4.2,-7.549) 27(4.6,-7.549) 28(5,-7.549) 29(5.4,-7.549) 30(5.8,-7.549) 61(5.8,7.549) 62(5.4,7.549) 63(5,7.549) 64(4.6,7.549) 65(4.2,7.549) 66(3.8,7.549) 67(3.4,7.549) 68(3,7.549) 69(2.6,7.549) 70(2.2,7.549) 71(1.8,7.549) 72(1.4,7.549) 73(1,7.549) 74(0.6,7.549) 75(0.2,7.549) 76(-0.2,7.549) 77(-0.6,7.549) 78(-1,7.549) 79(-1.4,7.549) 80(-1.8,7.549) 81(-2.2,7.549) 82(-2.6,7.549) 83(-3,7.549) 84(-3.4,7.549) 85(-3.8,7.549) 86(-4.2,7.549) 87(-4.6,7.549) 88(-5,7.549) 89(-5.4,7.549) 90(-5.8,7.549)
  oval 1.4x0.2 smd: 31(7.549,-5.8) 32(7.549,-5.4) 33(7.549,-5) 34(7.549,-4.6) 35(7.549,-4.2) 36(7.549,-3.8) 37(7.549,-3.4) 38(7.549,-3) 39(7.549,-2.6) 40(7.549,-2.2) 41(7.549,-1.8) 42(7.549,-1.4) 43(7.549,-1) 44(7.549,-0.6) 45(7.549,-0.2) 46(7.549,0.2) 47(7.549,0.6) 48(7.549,1) 49(7.549,1.4) 50(7.549,1.8) 51(7.549,2.2) 52(7.549,2.6) 53(7.549,3) 54(7.549,3.4) 55(7.549,3.8) 56(7.549,4.2) 57(7.549,4.6) 58(7.549,5) 59(7.549,5.4) 60(7.549,5.8) 91(-7.549,5.8) 92(-7.549,5.4) 93(-7.549,5) 94(-7.549,4.6) 95(-7.549,4.2) 96(-7.549,3.8) 97(-7.549,3.4) 98(-7.549,3) 99(-7.549,2.6) 100(-7.549,2.2) 101(-7.549,1.8) 102(-7.549,1.4) 103(-7.549,1) 104(-7.549,0.6) 105(-7.549,0.2) 106(-7.549,-0.2) 107(-7.549,-0.6) 108(-7.549,-1) 109(-7.549,-1.4) 110(-7.549,-1.8) 111(-7.549,-2.2) 112(-7.549,-2.6) 113(-7.549,-3) 114(-7.549,-3.4) 115(-7.549,-3.8) 116(-7.549,-4.2) 117(-7.549,-4.6) 118(-7.549,-5) 119(-7.549,-5.4) 120(-7.549,-5.8)
Top Overlay:
  circle w0.508: c-6.604,-7.874 r0.127
  circle w0.254: c-4.572,-4.572 r0.762
  lines w0.254: -6.096,-6.096 6.096,-6.096 6.096,6.096 -6.096,6.096 -6.096,-6.096
Mechanical 13:
  circle w0.1: c-6.1,-6.1 r0.5
  lines w0.1: -7,-7 7,-7 7,7 -7,7 -7,-7
Mechanical 15:
  circle w0.05: c0,0 r0.35
  lines w0.05: -0.5,0 0.5,0 ; 0,-0.5 0,0.5
  lines w0.1: -8.509,-8.509 8.509,-8.509 8.509,8.509 -8.509,8.509 -8.509,-8.509
3D body "TQFP120 14x14.STEP": height 1.05, standoff -0.01, extent -8.002,-8.002 8.002,8.002

## TQFP120 14x14_M [mm] "120脚，体宽：14x14mm, 脚距：0.4mm"
pads (120):
  oval 0.26x1.8 smd: 1(-5.8,-7.854) 2(-5.4,-7.854) 3(-5,-7.854) 4(-4.6,-7.854) 5(-4.2,-7.854) 6(-3.8,-7.854) 7(-3.4,-7.854) 8(-3,-7.854) 9(-2.6,-7.854) 10(-2.2,-7.854) 11(-1.8,-7.854) 12(-1.4,-7.854) 13(-1,-7.854) 14(-0.6,-7.854) 15(-0.2,-7.854) 16(0.2,-7.854) 17(0.6,-7.854) 18(1,-7.854) 19(1.4,-7.854) 20(1.8,-7.854) 21(2.2,-7.854) 22(2.6,-7.854) 23(3,-7.854) 24(3.4,-7.854) 25(3.8,-7.854) 26(4.2,-7.854) 27(4.6,-7.854) 28(5,-7.854) 29(5.4,-7.854) 30(5.8,-7.854) 61(5.825,7.854) 62(5.4,7.854) 63(5,7.854) 64(4.6,7.854) 65(4.2,7.854) 66(3.8,7.854) 67(3.4,7.854) 68(3,7.854) 69(2.6,7.854) 70(2.2,7.854) 71(1.8,7.854) 72(1.4,7.854) 73(1,7.854) 74(0.6,7.854) 75(0.2,7.854) 76(-0.2,7.854) 77(-0.6,7.854) 78(-1,7.854) 79(-1.4,7.854) 80(-1.8,7.854) 81(-2.2,7.854) 82(-2.6,7.854) 83(-3,7.854) 84(-3.4,7.854) 85(-3.8,7.854) 86(-4.2,7.854) 87(-4.6,7.854) 88(-5,7.854) 89(-5.4,7.854) 90(-5.8,7.854)
  oval 1.8x0.26 smd: 31(7.854,-5.8) 32(7.854,-5.4) 33(7.854,-5) 34(7.854,-4.6) 35(7.854,-4.2) 36(7.854,-3.8) 37(7.854,-3.4) 38(7.854,-3) 39(7.854,-2.6) 40(7.854,-2.2) 41(7.854,-1.8) 42(7.854,-1.4) 43(7.854,-1) 44(7.854,-0.6) 45(7.854,-0.2) 46(7.854,0.2) 47(7.854,0.6) 48(7.854,1) 49(7.854,1.4) 50(7.854,1.8) 51(7.854,2.2) 52(7.854,2.6) 53(7.854,3) 54(7.854,3.4) 55(7.854,3.8) 56(7.854,4.2) 57(7.854,4.6) 58(7.854,5) 59(7.854,5.4) 60(7.854,5.8) 91(-7.854,5.8) 92(-7.854,5.4) 93(-7.854,5) 94(-7.854,4.6) 95(-7.854,4.2) 96(-7.854,3.8) 97(-7.854,3.4) 98(-7.854,3) 99(-7.854,2.6) 100(-7.854,2.2) 101(-7.854,1.8) 102(-7.854,1.4) 103(-7.854,1) 104(-7.854,0.6) 105(-7.854,0.2) 106(-7.854,-0.2) 107(-7.854,-0.6) 108(-7.854,-1) 109(-7.854,-1.4) 110(-7.854,-1.8) 111(-7.854,-2.2) 112(-7.854,-2.6) 113(-7.854,-3) 114(-7.854,-3.4) 115(-7.854,-3.8) 116(-7.854,-4.2) 117(-7.854,-4.6) 118(-7.854,-5) 119(-7.854,-5.4) 120(-7.854,-5.8)
Top Overlay:
  circle w0.508: c-6.604,-8.128 r0.127
  circle w0.254: c-4.572,-4.572 r0.762
  lines w0.254: -6.096,-6.096 6.096,-6.096 6.096,6.096 -6.096,6.096 -6.096,-6.096
Mechanical 13:
  circle w0.1: c-6.1,-6.1 r0.5
  lines w0.1: -7,-7 7,-7 7,7 -7,7 -7,-7
Mechanical 15:
  circle w0.05: c0,0 r0.35
  lines w0.05: -0.5,0 0.5,0 ; 0,-0.5 0,0.5
  lines w0.1: -9.017,-9.017 9.017,-9.017 9.017,9.017 -9.017,9.017 -9.017,-9.017
3D body "TQFP120 14x14.STEP": height 1.05, standoff -0.01, extent -8.002,-8.002 8.002,8.002

## TQFP120 14x14_N [mm] "120脚，体宽：14x14mm, 脚距：0.4mm 淘宝ID:黄晶宝石"
pads (120):
  oval 0.23x1.6 smd: 1(-5.8,-7.651) 2(-5.4,-7.651) 3(-5,-7.651) 4(-4.6,-7.651) 5(-4.2,-7.651) 6(-3.8,-7.651) 7(-3.4,-7.651) 8(-3,-7.651) 9(-2.6,-7.651) 10(-2.2,-7.651) 11(-1.8,-7.651) 12(-1.4,-7.651) 13(-1,-7.651) 14(-0.6,-7.651) 15(-0.2,-7.651) 16(0.2,-7.651) 17(0.6,-7.651) 18(1,-7.651) 19(1.4,-7.651) 20(1.8,-7.651) 21(2.2,-7.651) 22(2.6,-7.651) 23(3,-7.651) 24(3.4,-7.651) 25(3.8,-7.651) 26(4.2,-7.651) 27(4.6,-7.651) 28(5,-7.651) 29(5.4,-7.651) 30(5.8,-7.651) 61(5.825,7.651) 62(5.4,7.651) 63(5,7.651) 64(4.6,7.651) 65(4.2,7.651) 66(3.8,7.651) 67(3.4,7.651) 68(3,7.651) 69(2.6,7.651) 70(2.2,7.651) 71(1.8,7.651) 72(1.4,7.651) 73(1,7.651) 74(0.6,7.651) 75(0.2,7.651) 76(-0.2,7.651) 77(-0.6,7.651) 78(-1,7.651) 79(-1.4,7.651) 80(-1.8,7.651) 81(-2.2,7.651) 82(-2.6,7.651) 83(-3,7.651) 84(-3.4,7.651) 85(-3.8,7.651) 86(-4.2,7.651) 87(-4.6,7.651) 88(-5,7.651) 89(-5.4,7.651) 90(-5.8,7.651)
  oval 1.6x0.23 smd: 31(7.651,-5.8) 32(7.651,-5.4) 33(7.651,-5) 34(7.651,-4.6) 35(7.651,-4.2) 36(7.651,-3.8) 37(7.651,-3.4) 38(7.651,-3) 39(7.651,-2.6) 40(7.651,-2.2) 41(7.651,-1.8) 42(7.651,-1.4) 43(7.651,-1) 44(7.651,-0.6) 45(7.651,-0.2) 46(7.651,0.2) 47(7.651,0.6) 48(7.651,1) 49(7.651,1.4) 50(7.651,1.8) 51(7.651,2.2) 52(7.651,2.6) 53(7.651,3) 54(7.651,3.4) 55(7.651,3.8) 56(7.651,4.2) 57(7.651,4.6) 58(7.651,5) 59(7.651,5.4) 60(7.651,5.8) 91(-7.651,5.8) 92(-7.651,5.4) 93(-7.651,5) 94(-7.651,4.6) 95(-7.651,4.2) 96(-7.651,3.8) 97(-7.651,3.4) 98(-7.651,3) 99(-7.651,2.6) 100(-7.651,2.2) 101(-7.651,1.8) 102(-7.651,1.4) 103(-7.651,1) 104(-7.651,0.6) 105(-7.651,0.2) 106(-7.651,-0.2) 107(-7.651,-0.6) 108(-7.651,-1) 109(-7.651,-1.4) 110(-7.651,-1.8) 111(-7.651,-2.2) 112(-7.651,-2.6) 113(-7.651,-3) 114(-7.651,-3.4) 115(-7.651,-3.8) 116(-7.651,-4.2) 117(-7.651,-4.6) 118(-7.651,-5) 119(-7.651,-5.4) 120(-7.651,-5.8)
Top Overlay:
  circle w0.254: c-4.572,-4.572 r0.762
  circle w0.508: c-6.604,-8.128 r0.127
  lines w0.254: -6.096,-6.096 -6.096,6.096 6.096,6.096 6.096,-6.096 -6.096,-6.096
Mechanical 13:
  circle w0.1: c-6.1,-6.1 r0.5
  lines w0.1: -7,-7 -7,7 7,7 7,-7 -7,-7
Mechanical 15:
  circle w0.05: c0,0 r0.35
  lines w0.05: -0.5,0 0.5,0 ; 0,-0.5 0,0.5
  lines w0.1: -8.636,-8.636 -8.636,8.636 8.636,8.636 8.636,-8.636 -8.636,-8.636
3D body "TQFP120 14x14.STEP": height 1.05, standoff -0.01, extent -8.002,-8.002 8.002,8.002

## TQFP120-14*14 [mm] "14x14mm, 0.4mm      封装库来自淘宝卖家 ID：黄晶宝石"
pads (120):
  oval 0.23x1.6 smd: 1(-5.8,-7.651) 2(-5.4,-7.651) 3(-5,-7.651) 4(-4.6,-7.651) 5(-4.2,-7.651) 6(-3.8,-7.651) 7(-3.4,-7.651) 8(-3,-7.651) 9(-2.6,-7.651) 10(-2.2,-7.651) 11(-1.8,-7.651) 12(-1.4,-7.651) 13(-1,-7.651) 14(-0.6,-7.651) 15(-0.2,-7.651) 16(0.2,-7.651) 17(0.6,-7.651) 18(1,-7.651) 19(1.4,-7.651) 20(1.8,-7.651) 21(2.2,-7.651) 22(2.6,-7.651) 23(3,-7.651) 24(3.4,-7.651) 25(3.8,-7.651) 26(4.2,-7.651) 27(4.6,-7.651) 28(5,-7.651) 29(5.4,-7.651) 30(5.8,-7.651) 61(5.825,7.651) 62(5.4,7.651) 63(5,7.651) 64(4.6,7.651) 65(4.2,7.651) 66(3.8,7.651) 67(3.4,7.651) 68(3,7.651) 69(2.6,7.651) 70(2.2,7.651) 71(1.8,7.651) 72(1.4,7.651) 73(1,7.651) 74(0.6,7.651) 75(0.2,7.651) 76(-0.2,7.651) 77(-0.6,7.651) 78(-1,7.651) 79(-1.4,7.651) 80(-1.8,7.651) 81(-2.2,7.651) 82(-2.6,7.651) 83(-3,7.651) 84(-3.4,7.651) 85(-3.8,7.651) 86(-4.2,7.651) 87(-4.6,7.651) 88(-5,7.651) 89(-5.4,7.651) 90(-5.8,7.651)
  oval 1.6x0.23 smd: 31(7.651,-5.8) 32(7.651,-5.4) 33(7.651,-5) 34(7.651,-4.6) 35(7.651,-4.2) 36(7.651,-3.8) 37(7.651,-3.4) 38(7.651,-3) 39(7.651,-2.6) 40(7.651,-2.2) 41(7.651,-1.8) 42(7.651,-1.4) 43(7.651,-1) 44(7.651,-0.6) 45(7.651,-0.2) 46(7.651,0.2) 47(7.651,0.6) 48(7.651,1) 49(7.651,1.4) 50(7.651,1.8) 51(7.651,2.2) 52(7.651,2.6) 53(7.651,3) 54(7.651,3.4) 55(7.651,3.8) 56(7.651,4.2) 57(7.651,4.6) 58(7.651,5) 59(7.651,5.4) 60(7.651,5.8) 91(-7.651,5.8) 92(-7.651,5.4) 93(-7.651,5) 94(-7.651,4.6) 95(-7.651,4.2) 96(-7.651,3.8) 97(-7.651,3.4) 98(-7.651,3) 99(-7.651,2.6) 100(-7.651,2.2) 101(-7.651,1.8) 102(-7.651,1.4) 103(-7.651,1) 104(-7.651,0.6) 105(-7.651,0.2) 106(-7.651,-0.2) 107(-7.651,-0.6) 108(-7.651,-1) 109(-7.651,-1.4) 110(-7.651,-1.8) 111(-7.651,-2.2) 112(-7.651,-2.6) 113(-7.651,-3) 114(-7.651,-3.4) 115(-7.651,-3.8) 116(-7.651,-4.2) 117(-7.651,-4.6) 118(-7.651,-5) 119(-7.651,-5.4) 120(-7.651,-5.8)
Top Overlay:
  circle w0.508: c-6.604,-8.128 r0.127
  lines w0.254: -6.096,-6.096 -6.096,6.096 6.096,6.096 6.096,-6.096 -6.096,-6.096
3D body "TQFP120_14x14.STEP": height 1.05, standoff 0, extent -8.002,-8.002 8.002,8.002